# Altium footprint library PcbLib.PcbLib: 162 footprints (part 9 of 11)
Each footprint in its own frame and in the unit in brackets; x right, y up, seen from the top. Pads: shape width x height; smd on the part's side, far side on the other; paste and mask are expansions set on the pad; w line width, h text height; cw(c..) or ccw(c..) is an arc to the next point about the centre after c.
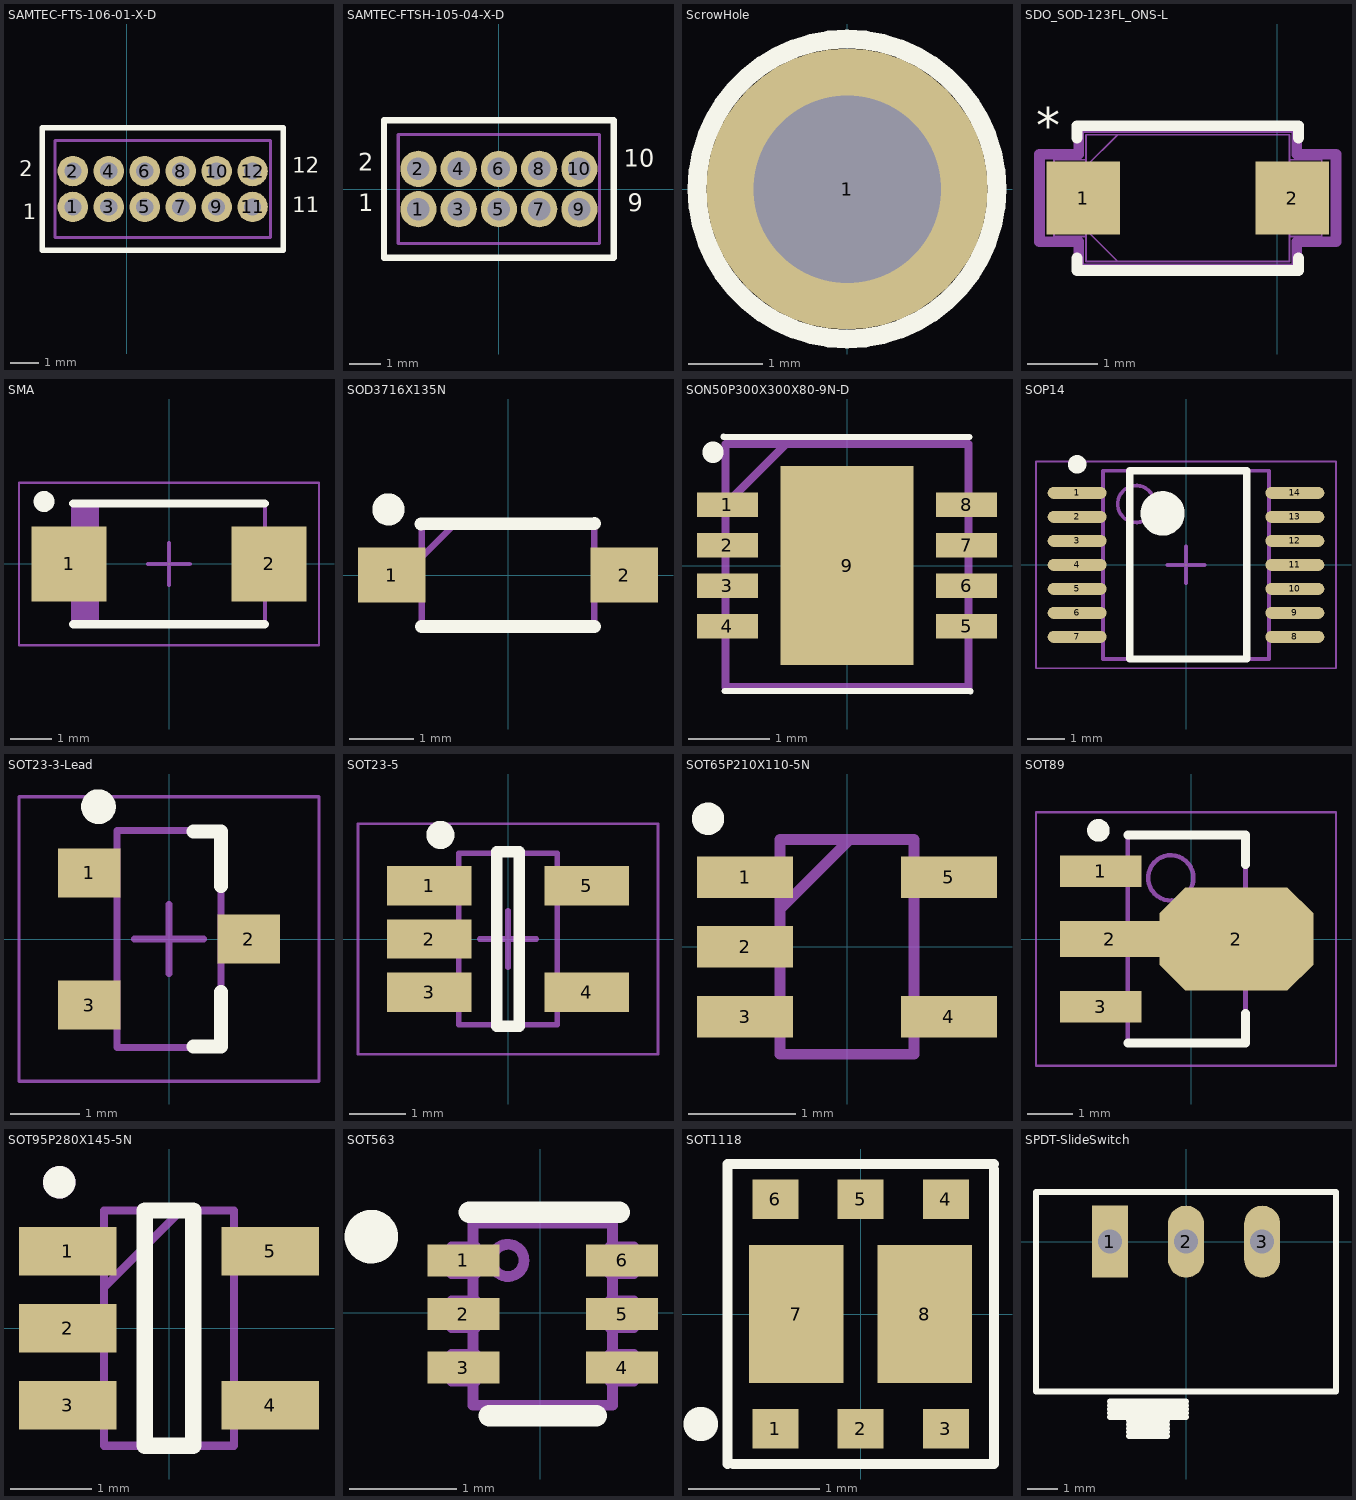
[diagram p8: the footprints below, top view; thin cyan lines are the x and y axes]

## SAMTEC-FTS-106-01-X-D [mm]
pads (12):
  round 1.08 hole 0.61: 1(-1.905,-12.319) 2(-1.905,-11.049) 3(-0.635,-12.319) 4(-0.635,-11.049) 5(0.635,-12.319) 6(0.635,-11.049) 7(1.905,-12.319) 8(1.905,-11.049) 9(3.175,-12.319) 10(3.175,-11.049) 11(4.445,-12.319) 12(4.445,-11.049)
Top Overlay:
  lines w0.2: -2.99,-13.849 -2.99,-9.519 5.53,-9.519 5.53,-13.849 -2.99,-13.849
  text "1" at -3.683,-12.954 h0.95
  text "2" at -3.81,-11.43 h0.95
  text "11" at 5.842,-12.7 h0.95
  text "12" at 5.842,-11.303 h0.95
Top Solder:
  circle w0: c-1.905,-12.319 r0.622
  circle w0: c-1.905,-11.049 r0.622
  circle w0: c-0.635,-12.319 r0.622
  circle w0: c-0.635,-11.049 r0.622
  circle w0: c0.635,-12.319 r0.622
  circle w0: c0.635,-11.049 r0.622
  circle w0: c1.905,-12.319 r0.622
  circle w0: c1.905,-11.049 r0.622
  circle w0: c3.175,-12.319 r0.622
  circle w0: c3.175,-11.049 r0.622
  circle w0: c4.445,-12.319 r0.622
  circle w0: c4.445,-11.049 r0.622
Bottom Solder:
  circle w0: c-1.905,-12.319 r0.622
  circle w0: c-1.905,-11.049 r0.622
  circle w0: c-0.635,-12.319 r0.622
  circle w0: c-0.635,-11.049 r0.622
  circle w0: c0.635,-12.319 r0.622
  circle w0: c0.635,-11.049 r0.622
  circle w0: c1.905,-12.319 r0.622
  circle w0: c1.905,-11.049 r0.622
  circle w0: c3.175,-12.319 r0.622
  circle w0: c3.175,-11.049 r0.622
  circle w0: c4.445,-12.319 r0.622
  circle w0: c4.445,-11.049 r0.622
Mechanical 16:
  lines w0.1: -2.54,-13.398 -2.54,-9.97 -1.27,-9.97 0,-9.97 1.27,-9.97 2.54,-9.97 3.81,-9.97 5.08,-9.97 5.08,-13.398 3.81,-13.398 2.54,-13.398 1.27,-13.398 0,-13.398 -1.27,-13.398 -2.54,-13.398 ; -2.108,-12.522 -1.702,-12.522 -1.702,-12.116 -2.108,-12.116 -2.108,-12.522 ; -2.108,-11.252 -2.108,-10.846 -1.702,-10.846 -1.702,-11.252 -2.108,-11.252 ; -0.838,-12.522 -0.838,-12.116 -0.432,-12.116 -0.432,-12.522 -0.838,-12.522 ; -0.838,-11.252 -0.838,-10.846 -0.432,-10.846 -0.432,-11.252 -0.838,-11.252 ; 0.432,-12.522 0.432,-12.116 0.838,-12.116 0.838,-12.522 0.432,-12.522 ; 0.432,-11.252 0.432,-10.846 0.838,-10.846 0.838,-11.252 0.432,-11.252 ; 1.702,-12.522 1.702,-12.116 2.108,-12.116 2.108,-12.522 1.702,-12.522 ; 1.702,-11.252 1.702,-10.846 2.108,-10.846 2.108,-11.252 1.702,-11.252 ; 2.972,-12.522 2.972,-12.116 3.378,-12.116 3.378,-12.522 2.972,-12.522 ; 2.972,-11.252 2.972,-10.846 3.378,-10.846 3.378,-11.252 2.972,-11.252 ; 4.242,-12.522 4.242,-12.116 4.648,-12.116 4.648,-12.522 4.242,-12.522 ; 4.242,-11.252 4.242,-10.846 4.648,-10.846 4.648,-11.252 4.242,-11.252
Mechanical 42:
  lines w0.1: -2.99,-13.849 -2.99,-9.519 5.53,-9.519 5.53,-13.849 -2.99,-13.849
3D body "FTS-106-01-L-D.stp": height 3.92, standoff -2.27, extent -2.54,-13.399 5.08,-9.97

## SAMTEC-FTSH-105-04-X-D [mil]
pads (10):
  round 45 hole 27.95: 1(-100,-25) 2(-100,25) 3(-50,-25) 4(-50,25) 5(0,-25) 6(0,25) 7(50,-25) 8(50,25) 9(100,-25) 10(100,25)
Top Overlay:
  lines w7.87: -142.72,-85.24 -142.72,85.24 142.72,85.24 142.72,-85.24 -142.72,-85.24
  text "1" at -175,-35 h37.5
  text "2" at -175,15 h37.5
  text "9" at 160,-35 h37.5
  text "10" at 155,20 h37.5
Top Solder:
  circle w0: c-100,-25 r24.51
  circle w0: c-100,25 r24.51
  circle w0: c-50,-25 r24.51
  circle w0: c-50,25 r24.51
  circle w0: c0,-25 r24.51
  circle w0: c0,25 r24.51
  circle w0: c50,-25 r24.51
  circle w0: c50,25 r24.51
  circle w0: c100,-25 r24.51
  circle w0: c100,25 r24.51
Bottom Solder:
  circle w0: c-100,-25 r24.51
  circle w0: c-100,25 r24.51
  circle w0: c-50,-25 r24.51
  circle w0: c-50,25 r24.51
  circle w0: c0,-25 r24.51
  circle w0: c0,25 r24.51
  circle w0: c50,-25 r24.51
  circle w0: c50,25 r24.51
  circle w0: c100,-25 r24.51
  circle w0: c100,25 r24.51
Mechanical 16:
  lines w3.94: -125,-67.48 -75,-67.48 ; -125,-67.48 -75,-67.48 ; -125,-67.48 -125,67.48 ; -125,67.48 -75,67.48 ; -125,67.48 -75,67.48 ; -107.99,-32.99 -107.99,-17.01 ; -107.99,-32.99 -92.01,-32.99 ; -107.99,-32.99 -92.01,-32.99 ; -107.99,-32.99 -107.99,-17.01 ; -107.99,-17.01 -92.01,-17.01 ; -107.99,-17.01 -92.01,-17.01 ; -107.99,17.01 -107.99,32.99 ; -107.99,17.01 -92.01,17.01 ; -107.99,17.01 -92.01,17.01 ; -107.99,17.01 -107.99,32.99 ; -107.99,32.99 -92.01,32.99 ; -107.99,32.99 -92.01,32.99 ; -92.01,-32.99 -92.01,-17.01 ; -92.01,-32.99 -92.01,-17.01 ; -92.01,17.01 -92.01,32.99 ; -92.01,17.01 -92.01,32.99 ; -75,-67.48 -25,-67.48 ; -75,-67.48 -25,-67.48 ; -75,67.48 -25,67.48 ; -75,67.48 -25,67.48 ; -57.99,-32.99 -57.99,-17.01 ; -57.99,-32.99 -42.01,-32.99 ; -57.99,-32.99 -42.01,-32.99 ; -57.99,-32.99 -57.99,-17.01 ; -57.99,-17.01 -42.01,-17.01 ; -57.99,-17.01 -42.01,-17.01 ; -57.99,17.01 -57.99,32.99 ; -57.99,17.01 -42.01,17.01 ; -57.99,17.01 -42.01,17.01 ; -57.99,17.01 -57.99,32.99 ; -57.99,32.99 -42.01,32.99 ; -57.99,32.99 -42.01,32.99 ; -42.01,-32.99 -42.01,-17.01 ; -42.01,-32.99 -42.01,-17.01 ; -42.01,17.01 -42.01,32.99 ; -42.01,17.01 -42.01,32.99 ; -25,-67.48 25,-67.48 ; -25,-67.48 25,-67.48 ; -25,67.48 25,67.48 ; -25,67.48 25,67.48 ; -7.99,-32.99 -7.99,-17.01 ; -7.99,-32.99 7.99,-32.99 ; -7.99,-32.99 7.99,-32.99 ; -7.99,-32.99 -7.99,-17.01 ; -7.99,-17.01 7.99,-17.01 ; -7.99,-17.01 7.99,-17.01 ; -7.99,17.01 -7.99,32.99 ; -7.99,17.01 7.99,17.01 ; -7.99,17.01 7.99,17.01 ; -7.99,17.01 -7.99,32.99 ; -7.99,32.99 7.99,32.99 ; -7.99,32.99 7.99,32.99 ; 7.99,-32.99 7.99,-17.01 ; 7.99,-32.99 7.99,-17.01 ; 7.99,17.01 7.99,32.99 ; 7.99,17.01 7.99,32.99 ; 25,-67.48 75,-67.48 ; 25,-67.48 75,-67.48 ; 25,67.48 75,67.48 ; 25,67.48 75,67.48 ; 42.01,-32.99 42.01,-17.01 ; 42.01,-32.99 57.99,-32.99 ; 42.01,-32.99 57.99,-32.99 ; 42.01,-32.99 42.01,-17.01 ; 42.01,-17.01 57.99,-17.01 ; 42.01,-17.01 57.99,-17.01 ; 42.01,17.01 42.01,32.99 ; 42.01,17.01 57.99,17.01 ; 42.01,17.01 57.99,17.01 ; 42.01,17.01 42.01,32.99 ; 42.01,32.99 57.99,32.99 ; 42.01,32.99 57.99,32.99 ; 57.99,-32.99 57.99,-17.01 ; 57.99,-32.99 57.99,-17.01 ; 57.99,17.01 57.99,32.99 ; 57.99,17.01 57.99,32.99 ; 75,-67.48 125,-67.48 125,67.48 75,67.48 ; 92.01,-32.99 107.99,-32.99 107.99,-17.01 92.01,-17.01 92.01,-32.99 ; 92.01,17.01 107.99,17.01 107.99,32.99 92.01,32.99 92.01,17.01
3D body "FTSH-105-04-F-D.stp": height 249.5, standoff -89.5, extent -125.01,-67.5 124.99,67.5

## ScrowHole [mm] "Hole for Scrows"
pads (1):
  round 3.81 hole 2.54: 1(0,0)
Top Overlay:
  circle w0.254: c0,0 r2.032

## SDO_SOD-123FL_ONS-L [mil]
pads (2):
  rect 41x41 smd paste+0 mask+4: 1(-108.5,-2910) 2(8.5,-2910)
Top Overlay:
  lines w6: -112,-2943.6 -112,-2950.5 12,-2950.5 12,-2943.6 ; -112,-2876.4 -112,-2869.5 12,-2869.5 12,-2876.4
  text "*" at -135,-2879 h19.68
Mechanical 13:
  lines w1: -107,-2927.75 -89.25,-2945.5 ; -107,-2892.25 -89.25,-2874.5 ; -125,-2931.5 -125,-2888.5 -107,-2888.5 -107,-2931.5 -125,-2931.5 ; -107,-2945.5 7,-2945.5 7,-2874.5 -107,-2874.5 -107,-2945.5 ; 7,-2931.5 7,-2888.5 25,-2888.5 25,-2931.5 7,-2931.5
  text "*" at -109.5,-2935 h50
Mechanical 15:
  lines w6: -133,-2934.5 -133,-2885.5 -111,-2885.5 -111,-2870.5 11,-2870.5 11,-2885.5 33,-2885.5 33,-2934.5 11,-2934.5 11,-2949.5 -111,-2949.5 -111,-2934.5 -133,-2934.5
3D body: height 10, standoff 0, extent -50,-2910 -40,-2900
3D body "SDO_SOD-123FL_ONS.step": height 39.25, standoff 0, extent -125,-2945.51 25,-2874.49

## SMA [mm] "Molded Diode, 2-Leads, Body 4.30x2.70mm"
height 2.5
pads (2):
  rect 1.8x1.8 smd: 1(-2.4,0) 2(2.4,0)
Top Overlay:
  circle w0.25: c-3,1.5 r0.125
  lines w0.2: -2.3,-1.45 2.3,-1.45 ; -2.3,1.45 2.3,1.45
Mechanical 13:
  rectangle: -2.3,-1.45 -1.681,1.45
  lines w0.1: -2.3,-1.45 2.3,-1.45 2.3,1.45 -2.3,1.45 -2.3,-1.45
Mechanical 15:
  lines w0.05: -3.6,-1.95 3.6,-1.95 3.6,1.95 -3.6,1.95 -3.6,-1.95
  lines w0.1: -0.5,0 0.5,0 ; 0,-0.5 0,0.5
3D body "SW3dPS-DO-214AC SMA.STEP": height 2.4, standoff 0, extent -2.6,-1.3 2.6,1.3

## SOD3716X135N [mm]
pads (2):
  rect 1.05x0.85 smd: 1(-1.8,0) 2(1.8,0)
Top Overlay:
  circle w0.25: c-1.854,1.016 r0.125
  lines w0.2: -1.346,0.787 1.34,0.8 ; -1.34,-0.8 1.34,-0.8
Mechanical 13:
  lines w0.1: -1.34,0.275 -0.815,0.8 ; -1.34,-0.8 -1.34,0.8 1.34,0.8 1.34,-0.8 -1.34,-0.8
3D body "MBR0540-TP.stp": height 1.35, standoff 0, extent -1.85,-0.8 1.85,0.8

## SON50P300X300X80-9N-D [mm]
pads (9):
  rect 0.749x0.3 smd mask+0.064: 1(-1.475,0.75) 2(-1.475,0.25) 3(-1.475,-0.25) 4(-1.475,-0.75) 5(1.475,-0.75) 6(1.475,-0.25) 7(1.475,0.25) 8(1.475,0.75)
  rect 1.638x2.455 smd: 9(0,0)
Top Overlay:
  circle w0.25: c-1.651,1.397 r0.006
  lines w0.076: -1.523,1.587 1.51,1.583 ; -1.51,-1.546 1.524,-1.549
Mechanical 13:
  lines w0.1: -1.5,0.75 -0.75,1.5 ; -1.5,-1.5 -1.5,1.5 1.5,1.5 1.5,-1.5 -1.5,-1.5
3D body "LT3092EDD#PBF.stp": height 0.8, standoff 0, extent -1.55,-1.5 1.55,1.5

## SOP14 [mm] "TSOP, 14-Leads, Body 5.00x4.40mm, Pitch 0.65mm, IPC Low Density"
height 1.05
pads (14):
  oval 1.6x0.32 smd: 1(-2.95,1.95) 2(-2.95,1.3) 3(-2.95,0.65) 4(-2.95,0) 5(-2.95,-0.65) 6(-2.95,-1.3) 7(-2.95,-1.95) 8(2.95,-1.95) 9(2.95,-1.3) 10(2.95,-0.65) 11(2.95,0) 12(2.95,0.65) 13(2.95,1.3) 14(2.95,1.95)
Top Overlay:
  circle w0.6: c-0.635,1.397 r0.3
  circle w0.25: c-2.95,2.725 r0.125
  lines w0.2: -1.524,-2.55 1.651,-2.55 1.651,2.55 -1.524,2.55 -1.524,-2.55
Mechanical 13:
  circle w0.1: c-1.35,1.65 r0.5
  lines w0.1: -2.25,-2.55 2.25,-2.55 2.25,2.55 -2.25,2.55 -2.25,-2.55
Mechanical 15:
  lines w0.05: -4.064,-2.8 4.064,-2.8 4.064,2.8 -4.064,2.8 -4.064,-2.8
  lines w0.1: -0.5,0 0.5,0 ; 0,-0.5 0,0.5
3D body "User Library-SSOP14P-P065.STEP": height 1.73, standoff -0.08, extent -3.05,-2.5 2.95,2.5

## SOT23-3-Lead [mm] "SOT23, 3-Leads, Body 2.92x2.40mm, Pitch 0.95mm, IPC Low Density"
height 1.2
pads (3):
  rect 0.9x0.7 smd: 1(-1.15,0.95) 2(1.15,0) 3(-1.15,-0.95)
Top Overlay:
  circle w0.25: c-1.016,1.905 r0.125
  lines w0.2: 0.35,-1.55 0.75,-1.55 0.75,-0.762 ; 0.35,1.55 0.75,1.55 0.75,0.762
Mechanical 13:
  lines w0.1: -0.75,-1.56 0.75,-1.56 0.75,1.56 -0.75,1.56 -0.75,-1.56
Mechanical 15:
  lines w0.05: -2.159,-2.05 2.159,-2.05 2.159,2.05 -2.159,2.05 -2.159,-2.05
  lines w0.1: -0.5,0 0.5,0 ; 0,-0.5 0,0.5
3D body "User Library-sot23-1.STEP": height 1, standoff 0, extent -1.17,-1.46 1.17,1.46

## SOT23-5 [mm] "SOT23, 5-Leads, Body 2.90x2.80mm, Pitch 0.95mm, IPC Low Density"
height 1.1
pads (5):
  rect 1.5x0.7 smd: 1(-1.4,0.95) 2(-1.4,0) 3(-1.4,-0.95) 4(1.4,-0.95) 5(1.4,0.95)
Top Overlay:
  circle w0.25: c-1.2,1.85 r0.125
  lines w0.2: -0.2,-1.55 0.2,-1.55 0.2,1.55 -0.2,1.55 -0.2,-1.55
Mechanical 13:
  lines w0.1: -0.875,-1.525 -0.875,1.525 0.875,1.525 0.875,-1.525 -0.875,-1.525
Mechanical 15:
  lines w0.05: -2.667,-2.05 -2.667,2.05 2.667,2.05 2.667,-2.05 -2.667,-2.05
  lines w0.1: -0.5,0 0.5,0 ; 0,-0.5 0,0.5
3D body "SOT-23-5_MC_MCH.step": height 1.45, standoff 0, extent -1.6,-1.549 1.6,1.549

## SOT65P210X110-5N [mm]
pads (5):
  rect 0.895x0.387 smd mask+0.089: 1(-0.95,0.65) 2(-0.95,0) 3(-0.95,-0.65) 4(0.95,-0.65) 5(0.95,0.65)
Top Overlay:
  circle w0.2: c-1.295,1.194 r0.051
Mechanical 13:
  lines w0.1: -0.625,0.35 0.025,1 ; -0.625,-1 -0.625,1 0.625,1 0.625,-1 -0.625,-1
3D body "OPA990IDCKR.stp": height 1.1, standoff 0, extent -1.05,-1 1.05,1

## SOT89 [mm] "SOT89, 3-Leads, Body 4.50x2.50mm, Pitch 1.50mm, Lead Span 4.0mm, IPC Low Density"
height 1.6
pads (4):
  rect 1.8x0.7 smd: 1(-2,1.5) 3(-2,-1.5)
  rect 2.2x0.8 smd: 2(-1.8,0)
  oct 3.404x2.286 smd: 2(1,0)
Top Overlay:
  circle w0.25: c-2.05,2.4 r0.125
  lines w0.2: -1.4,-2.3 1.2,-2.3 1.2,-1.651 ; -1.4,2.3 1.2,2.3 1.2,1.651
Mechanical 13:
  circle w0.1: c-0.45,1.35 r0.5
  lines w0.1: -1.4,-2.3 1.2,-2.3 1.2,2.3 -1.4,2.3 -1.4,-2.3
Mechanical 15:
  lines w0.05: -3.429,-2.8 3.2,-2.8 3.2,2.8 -3.429,2.8 -3.429,-2.8
  lines w0.1: -0.6,0 0.4,0 ; -0.1,-0.5 -0.1,0.5
3D body "SW3dPS-SOT89.STEP": height 1.58, standoff -0.03, extent -2.252,-2.286 1.998,2.314

## SOT95P280X145-5N [mm]
pads (5):
  rect 1.2x0.6 smd: 1(-1.25,0.95) 2(-1.25,0) 3(-1.25,-0.95) 4(1.25,-0.95) 5(1.25,0.95)
Top Overlay:
  circle w0.2: c-1.354,1.8 r0.1
  lines w0.2: -0.3,-1.45 -0.3,1.45 0.3,1.45 0.3,-1.45 -0.3,-1.45
Mechanical 13:
  circle w0.2: c-1.354,1.8 r0.1
  lines w0.1: -0.8,0.5 0.15,1.45 ; -0.8,-1.45 -0.8,1.45 0.8,1.45 0.8,-1.45 -0.8,-1.45
3D body "LMR64010XMFE_NOPB.stp": height 1.2, standoff 0, extent -1.4,-1.45 1.4,1.45

## SOT563 [mm] "6 lead 1.20 mm × 1.60 mm"
pads (6):
  rect 0.67x0.3 smd paste+0 mask+0: 1(-0.716,0.489) 2(-0.716,-0.011) 3(-0.716,-0.511) 4(0.764,-0.511) 5(0.764,-0.011) 6(0.764,0.489)
Top Overlay:
  circle w0.25: c-1.575,0.711 r0.125
  lines w0.2: -0.663,0.94 0.737,0.94 ; -0.476,-0.961 0.524,-0.961
Mechanical 13:
  circle w0.1: c-0.301,0.489 r0.15
  lines w0.1: -0.626,-0.636 -0.626,-0.861 0.674,-0.861 0.674,-0.636 ; -0.626,-0.386 -0.626,-0.136 ; -0.626,0.114 -0.626,0.364 ; -0.626,0.614 -0.626,0.839 0.674,0.839 0.674,0.614 ; 0.674,-0.386 0.674,0.364 ; -0.826,-0.636 -0.826,-0.386 -0.603,-0.386 -0.603,-0.636 -0.826,-0.636 ; -0.826,-0.136 -0.603,-0.136 -0.603,0.114 -0.826,0.114 -0.826,-0.136 ; -0.826,0.364 -0.826,0.614 -0.603,0.614 -0.603,0.364 -0.826,0.364 ; 0.651,-0.636 0.651,-0.386 0.874,-0.386 0.874,-0.636 0.651,-0.636 ; 0.651,-0.136 0.874,-0.136 0.874,0.114 0.651,0.114 0.651,-0.136 ; 0.651,0.364 0.651,0.614 0.874,0.614 0.874,0.364 0.651,0.364
3D body "DRL0006A.stp": height 0.6, standoff 0, extent -0.776,-0.811 0.824,0.789
3D body: height 0.25, standoff 0, extent 0.024,-0.011 0.278,0.243

## SOT1118 [mm]
pads (8):
  rect 0.35x0.3 smd mask+0: 1(-0.65,-0.875) 2(0,-0.875) 3(0.65,-0.875) 4(0.65,0.875) 5(0,0.875) 6(-0.65,0.875)
  rect 0.72x1.05 smd mask+0: 7(-0.49,0) 8(0.49,0)
Top Overlay:
  circle w0.25: c-1.219,-0.838 r0.006
  lines w0.076: -1.016,-1.143 -1.016,1.143 1.016,1.143 ; -0.973,-1.143 1.016,-1.143 1.016,1.1
Top Solder:
  region: -0.425,0.676 -0.877,0.676 -0.877,1.075 -0.425,1.075
  region: 0.875,0.676 0.426,0.676 0.426,1.075 0.875,1.075
  region: 0.225,0.675 -0.225,0.675 -0.225,1.075 0.225,1.075
  region: -0.425,-1.079 -0.878,-1.079 -0.878,-0.675 -0.425,-0.675
  region: 0.875,-1.077 0.426,-1.077 0.426,-0.675 0.875,-0.675
  region: 0.225,-1.078 -0.226,-1.078 -0.226,-0.675 0.225,-0.675
  region: 0.9,-0.577 0.08,-0.577 0.08,0.575 0.9,0.575
  region: -0.08,-0.577 -0.903,-0.577 -0.903,0.575 -0.08,0.575
3D body "PMDPB58UPE,115.STEP": height 0.66, standoff 0.01, extent -1,-1 1,1

## SPDT-SlideSwitch [mm] "SPDT Slide Switch"
height 3
pads (3):
  rect 1.2x2.4 hole 0.8: 1(-2.54,0)
  oval 1.2x2.4 hole 0.8: 2(0,0) 3(2.54,0)
Top Overlay:
  lines w0.2: -2.54,-5.842 0,-5.842 ; -2.54,-5.588 0,-5.588 ; -2.54,-5.461 0,-5.461 ; -2.54,-5.334 0,-5.334 ; -1.905,-6.477 -0.635,-6.477 ; -1.905,-6.35 -0.635,-6.35 ; -1.905,-6.223 -0.635,-6.223 ; -1.905,-6.096 -0.635,-6.096 ; -1.905,-5.969 -0.635,-5.969 ; -5,-5 5,-5 5,1.651 -5,1.651 -5,-5 ; -2.54,-5.715 0,-5.715 -2.54,-5.715
3D body "43709.stp": height 2.55, standoff -3.65, extent -5,-6.781 5,0.319